# EAGLE library part Connector_Generic_Conn_01x08 (library Dragon-Parts)
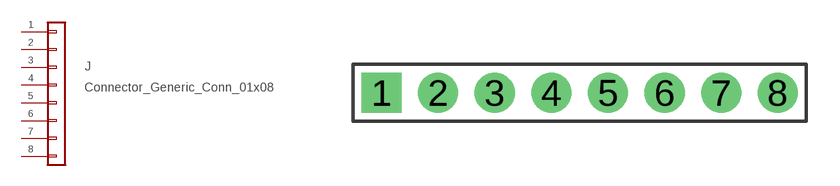
[diagram p0: symbol with the pads of HEADER_1X8_P2.54; footprint HEADER_1X8_P2.54]

Designator prefix J

## Connector_Generic_Conn_01x08-THT  [HEADER_1X8_P2.54]
1  1  pas
2  2  pas
3  3  pas
4  4  pas
5  5  pas
6  6  pas
7  7  pas
8  8  pas

## Footprint HEADER_1X8_P2.54 (pad centres in mm)
Provisional through-hole footprint: verify actual component dimensions. Header pin order is the schematic harness order.
drill 1 pad 1.8 square: 1 0,0
drill 1 pad 1.8 round: 2 2.54,0; 3 5.08,0; 4 7.62,0; 5 10.16,0; 6 12.7,0; 7 15.24,0; 8 17.78,0